# Altium schematic symbol library WR-TBL_Pluggable Connector.SchLib: 879 symbols (part 15 of 15)
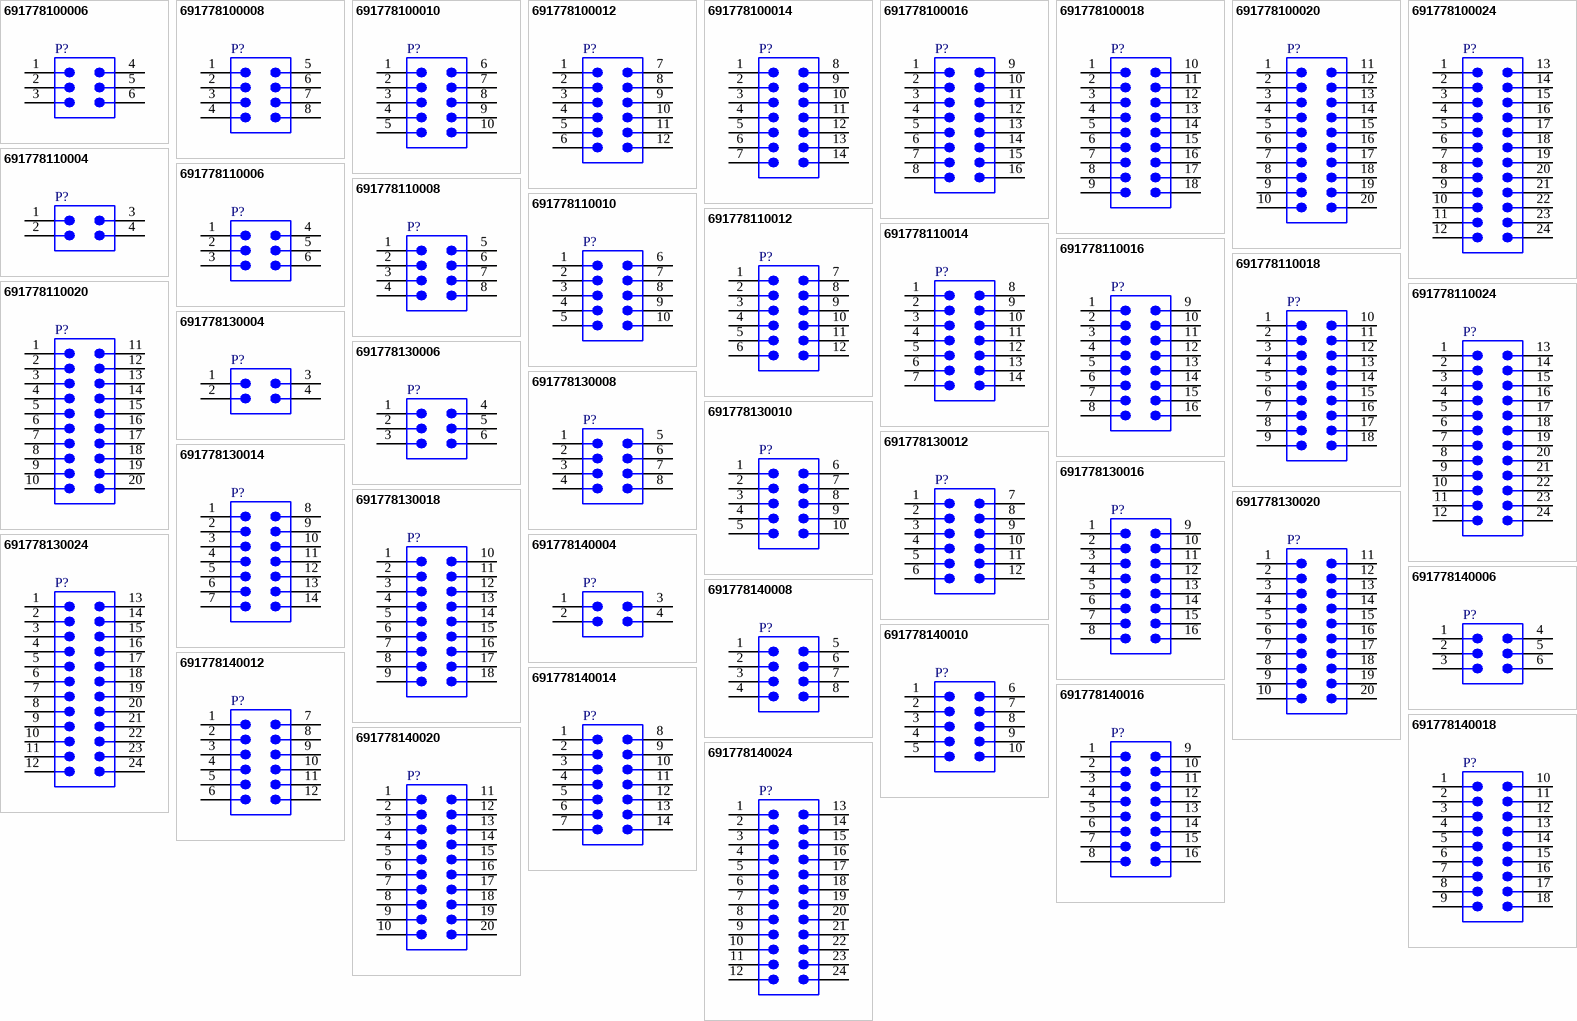
[diagram p35: symbols 691778100006 to 691778140024]

## 691778130024
designator P?  (value not drawn)
WR-TBL Series 7781 PCB Header Dual Row Vertical with flanges, THR, pitch 3.5mm, 24p; Manufacturer: Wurth Elektronik; Insulator Material: LCP; Rated Current: 8A; Working Voltage: 300V (AC); Withstanding Voltage: 1600V (AC); Manufacturer Part Number: 691778130024; Product Series: WR-TBL; ComponentLink1Description: Website Link; ComponentLink1URL: https://www.we-online.com; ComponentLink2Description: Datasheet Link; ComponentLink2URL: https://www.we-online.com/components/products/datasheet/691778130024; Mount: Through Hole Reflow; Operating Temperature Min: -40degC; Operating Temperature Max: 130degC; Packaging: Tape and Reel; Application: Pluggable; Number of Pins: 24; Number of Rows: 2; Orientation: Vertical; Lead Pitch: 3.5mm
footprint 691778130024
pins: 1, 2, 3, 4, 5, 6, 7, 8, 9, 10, 11, 12, 13, 14, 15, 16, 17, 18, 19, 20, 21, 22, 23, 24

## 691778140004
designator P?  (value not drawn)
WR-TBL Series 7781 PCB Header Dual Row Horizontal with flanges, THR, pitch 3.5mm, 04p; Manufacturer: Wurth Elektronik; Insulator Material: LCP; Rated Current: 8A; Working Voltage: 150V (AC); Withstanding Voltage: 1300V (AC); Manufacturer Part Number: 691778140004; Product Series: WR-TBL; ComponentLink1Description: Website Link; ComponentLink1URL: https://www.we-online.com; ComponentLink2Description: Datasheet Link; ComponentLink2URL: https://www.we-online.com/components/products/datasheet/691778140004; Mount: Through Hole Reflow; Operating Temperature Min: -40degC; Operating Temperature Max: 130degC; Packaging: Tape and Reel; Application: Pluggable; Number of Pins: 4; Number of Rows: 2; Orientation: Horizontal; Lead Pitch: 3.5mm
footprint 691778140004
pins: 1, 2, 3, 4

## 691778140006
designator P?  (value not drawn)
WR-TBL Series 7781 PCB Header Dual Row Horizontal with flanges, THR, pitch 3.5mm, 06p; Manufacturer: Wurth Elektronik; Insulator Material: LCP; Rated Current: 8A; Working Voltage: 150V (AC); Withstanding Voltage: 1300V (AC); Manufacturer Part Number: 691778140006; Product Series: WR-TBL; ComponentLink1Description: Website Link; ComponentLink1URL: https://www.we-online.com; ComponentLink2Description: Datasheet Link; ComponentLink2URL: https://www.we-online.com/components/products/datasheet/691778140006; Mount: Through Hole Reflow; Operating Temperature Min: -40degC; Operating Temperature Max: 130degC; Packaging: Tape and Reel; Application: Pluggable; Number of Pins: 6; Number of Rows: 2; Orientation: Horizontal; Lead Pitch: 3.5mm
footprint 691778140006
pins: 1, 2, 3, 4, 5, 6

## 691778140008
designator P?  (value not drawn)
WR-TBL Series 7781 PCB Header Dual Row Horizontal with flanges, THR, pitch 3.5mm, 08p; Manufacturer: Wurth Elektronik; Insulator Material: LCP; Rated Current: 8A; Working Voltage: 150V (AC); Withstanding Voltage: 1300V (AC); Manufacturer Part Number: 691778140008; Product Series: WR-TBL; ComponentLink1Description: Website Link; ComponentLink1URL: https://www.we-online.com; ComponentLink2Description: Datasheet Link; ComponentLink2URL: https://www.we-online.com/components/products/datasheet/691778140008; Mount: Through Hole Reflow; Operating Temperature Min: -40degC; Operating Temperature Max: 130degC; Packaging: Tape and Reel; Application: Pluggable; Number of Pins: 8; Number of Rows: 2; Orientation: Horizontal; Lead Pitch: 3.5mm
footprint 691778140008
pins: 1, 2, 3, 4, 5, 6, 7, 8

## 691778140010
designator P?  (value not drawn)
WR-TBL Series 7781 PCB Header Dual Row Horizontal with flanges, THR, pitch 3.5mm, 10p; Manufacturer: Wurth Elektronik; Insulator Material: LCP; Rated Current: 8A; Working Voltage: 150V (AC); Withstanding Voltage: 1300V (AC); Manufacturer Part Number: 691778140010; Product Series: WR-TBL; ComponentLink1Description: Website Link; ComponentLink1URL: https://www.we-online.com; ComponentLink2Description: Datasheet Link; ComponentLink2URL: https://www.we-online.com/components/products/datasheet/691778140010; Mount: Through Hole Reflow; Operating Temperature Min: -40degC; Operating Temperature Max: 130degC; Packaging: Tape and Reel; Application: Pluggable; Number of Pins: 10; Number of Rows: 2; Orientation: Horizontal; Lead Pitch: 3.5mm
footprint 691778140010
pins: 1, 2, 3, 4, 5, 6, 7, 8, 9, 10

## 691778140012
designator P?  (value not drawn)
WR-TBL Series 7781 PCB Header Dual Row Horizontal with flanges, THR, pitch 3.5mm, 12p; Manufacturer: Wurth Elektronik; Insulator Material: LCP; Rated Current: 8A; Working Voltage: 150V (AC); Withstanding Voltage: 1300V (AC); Manufacturer Part Number: 691778140012; Product Series: WR-TBL; ComponentLink1Description: Website Link; ComponentLink1URL: https://www.we-online.com; ComponentLink2Description: Datasheet Link; ComponentLink2URL: https://www.we-online.com/components/products/datasheet/691778140012; Mount: Through Hole Reflow; Operating Temperature Min: -40degC; Operating Temperature Max: 130degC; Packaging: Tape and Reel; Application: Pluggable; Number of Pins: 12; Number of Rows: 2; Orientation: Horizontal; Lead Pitch: 3.5mm
footprint 691778140012
pins: 1, 2, 3, 4, 5, 6, 7, 8, 9, 10, 11, 12

## 691778140014
designator P?  (value not drawn)
WR-TBL Series 7781 PCB Header Dual Row Horizontal with flanges, THR, pitch 3.5mm, 14p; Manufacturer: Wurth Elektronik; Insulator Material: LCP; Rated Current: 8A; Working Voltage: 150V (AC); Withstanding Voltage: 1300V (AC); Manufacturer Part Number: 691778140014; Product Series: WR-TBL; ComponentLink1Description: Website Link; ComponentLink1URL: https://www.we-online.com; ComponentLink2Description: Datasheet Link; ComponentLink2URL: https://www.we-online.com/components/products/datasheet/691778140014; Mount: Through Hole Reflow; Operating Temperature Min: -40degC; Operating Temperature Max: 130degC; Packaging: Tape and Reel; Application: Pluggable; Number of Pins: 14; Number of Rows: 2; Orientation: Horizontal; Lead Pitch: 3.5mm
footprint 691778140014
pins: 1, 2, 3, 4, 5, 6, 7, 8, 9, 10, 11, 12, 13, 14

## 691778140016
designator P?  (value not drawn)
WR-TBL Series 7781 PCB Header Dual Row Horizontal with flanges, THR, pitch 3.5mm, 16p; Manufacturer: Wurth Elektronik; Insulator Material: LCP; Rated Current: 8A; Working Voltage: 150V (AC); Withstanding Voltage: 1300V (AC); Manufacturer Part Number: 691778140016; Product Series: WR-TBL; ComponentLink1Description: Website Link; ComponentLink1URL: https://www.we-online.com; ComponentLink2Description: Datasheet Link; ComponentLink2URL: https://www.we-online.com/components/products/datasheet/691778140016; Mount: Through Hole Reflow; Operating Temperature Min: -40degC; Operating Temperature Max: 130degC; Packaging: Tape and Reel; Application: Pluggable; Number of Pins: 16; Number of Rows: 2; Orientation: Horizontal; Lead Pitch: 3.5mm
footprint 691778140016
pins: 1, 2, 3, 4, 5, 6, 7, 8, 9, 10, 11, 12, 13, 14, 15, 16

## 691778140018
designator P?  (value not drawn)
WR-TBL Series 7781 PCB Header Dual Row Horizontal with flanges, THR, pitch 3.5mm, 18p; Manufacturer: Wurth Elektronik; Insulator Material: LCP; Rated Current: 8A; Working Voltage: 150V (AC); Withstanding Voltage: 1300V (AC); Manufacturer Part Number: 691778140018; Product Series: WR-TBL; ComponentLink1Description: Website Link; ComponentLink1URL: https://www.we-online.com; ComponentLink2Description: Datasheet Link; ComponentLink2URL: https://www.we-online.com/components/products/datasheet/691778140018; Mount: Through Hole Reflow; Operating Temperature Min: -40degC; Operating Temperature Max: 130degC; Packaging: Tape and Reel; Application: Pluggable; Number of Pins: 18; Number of Rows: 2; Orientation: Horizontal; Lead Pitch: 3.5mm
footprint 691778140018
pins: 1, 2, 3, 4, 5, 6, 7, 8, 9, 10, 11, 12, 13, 14, 15, 16, 17, 18

## 691778140020
designator P?  (value not drawn)
WR-TBL Series 7781 PCB Header Dual Row Horizontal with flanges, THR, pitch 3.5mm, 20p; Manufacturer: Wurth Elektronik; Insulator Material: LCP; Rated Current: 8A; Working Voltage: 150V (AC); Withstanding Voltage: 1300V (AC); Manufacturer Part Number: 691778140020; Product Series: WR-TBL; ComponentLink1Description: Website Link; ComponentLink1URL: https://www.we-online.com; ComponentLink2Description: Datasheet Link; ComponentLink2URL: https://www.we-online.com/components/products/datasheet/691778140020; Mount: Through Hole Reflow; Operating Temperature Min: -40degC; Operating Temperature Max: 130degC; Packaging: Tape and Reel; Application: Pluggable; Number of Pins: 20; Number of Rows: 2; Orientation: Horizontal; Lead Pitch: 3.5mm
footprint 691778140020
pins: 1, 2, 3, 4, 5, 6, 7, 8, 9, 10, 11, 12, 13, 14, 15, 16, 17, 18, 19, 20

## 691778140024
designator P?  (value not drawn)
WR-TBL Series 7781 PCB Header Dual Row Horizontal with flanges, THR, pitch 3.5mm, 24p; Manufacturer: Wurth Elektronik; Insulator Material: LCP; Rated Current: 8A; Working Voltage: 150V (AC); Withstanding Voltage: 1300V (AC); Manufacturer Part Number: 691778140024; Product Series: WR-TBL; ComponentLink1Description: Website Link; ComponentLink1URL: https://www.we-online.com; ComponentLink2Description: Datasheet Link; ComponentLink2URL: https://www.we-online.com/components/products/datasheet/691778140024; Mount: Through Hole Reflow; Operating Temperature Min: -40degC; Operating Temperature Max: 130degC; Packaging: Tape and Reel; Application: Pluggable; Number of Pins: 24; Number of Rows: 2; Orientation: Horizontal; Lead Pitch: 3.5mm
footprint 691778140024
pins: 1, 2, 3, 4, 5, 6, 7, 8, 9, 10, 11, 12, 13, 14, 15, 16, 17, 18, 19, 20, 21, 22, 23, 24